# Altium footprint library LimeMicroAltiumLib.PcbLib: 876 footprints (part 29 of 57)
Each footprint in its own frame and in the unit in brackets; x right, y up, seen from the top. Pads: shape width x height; smd on the part's side, far side on the other; paste and mask are expansions set on the pad; w line width, h text height; cw(c..) or ccw(c..) is an arc to the next point about the centre after c.
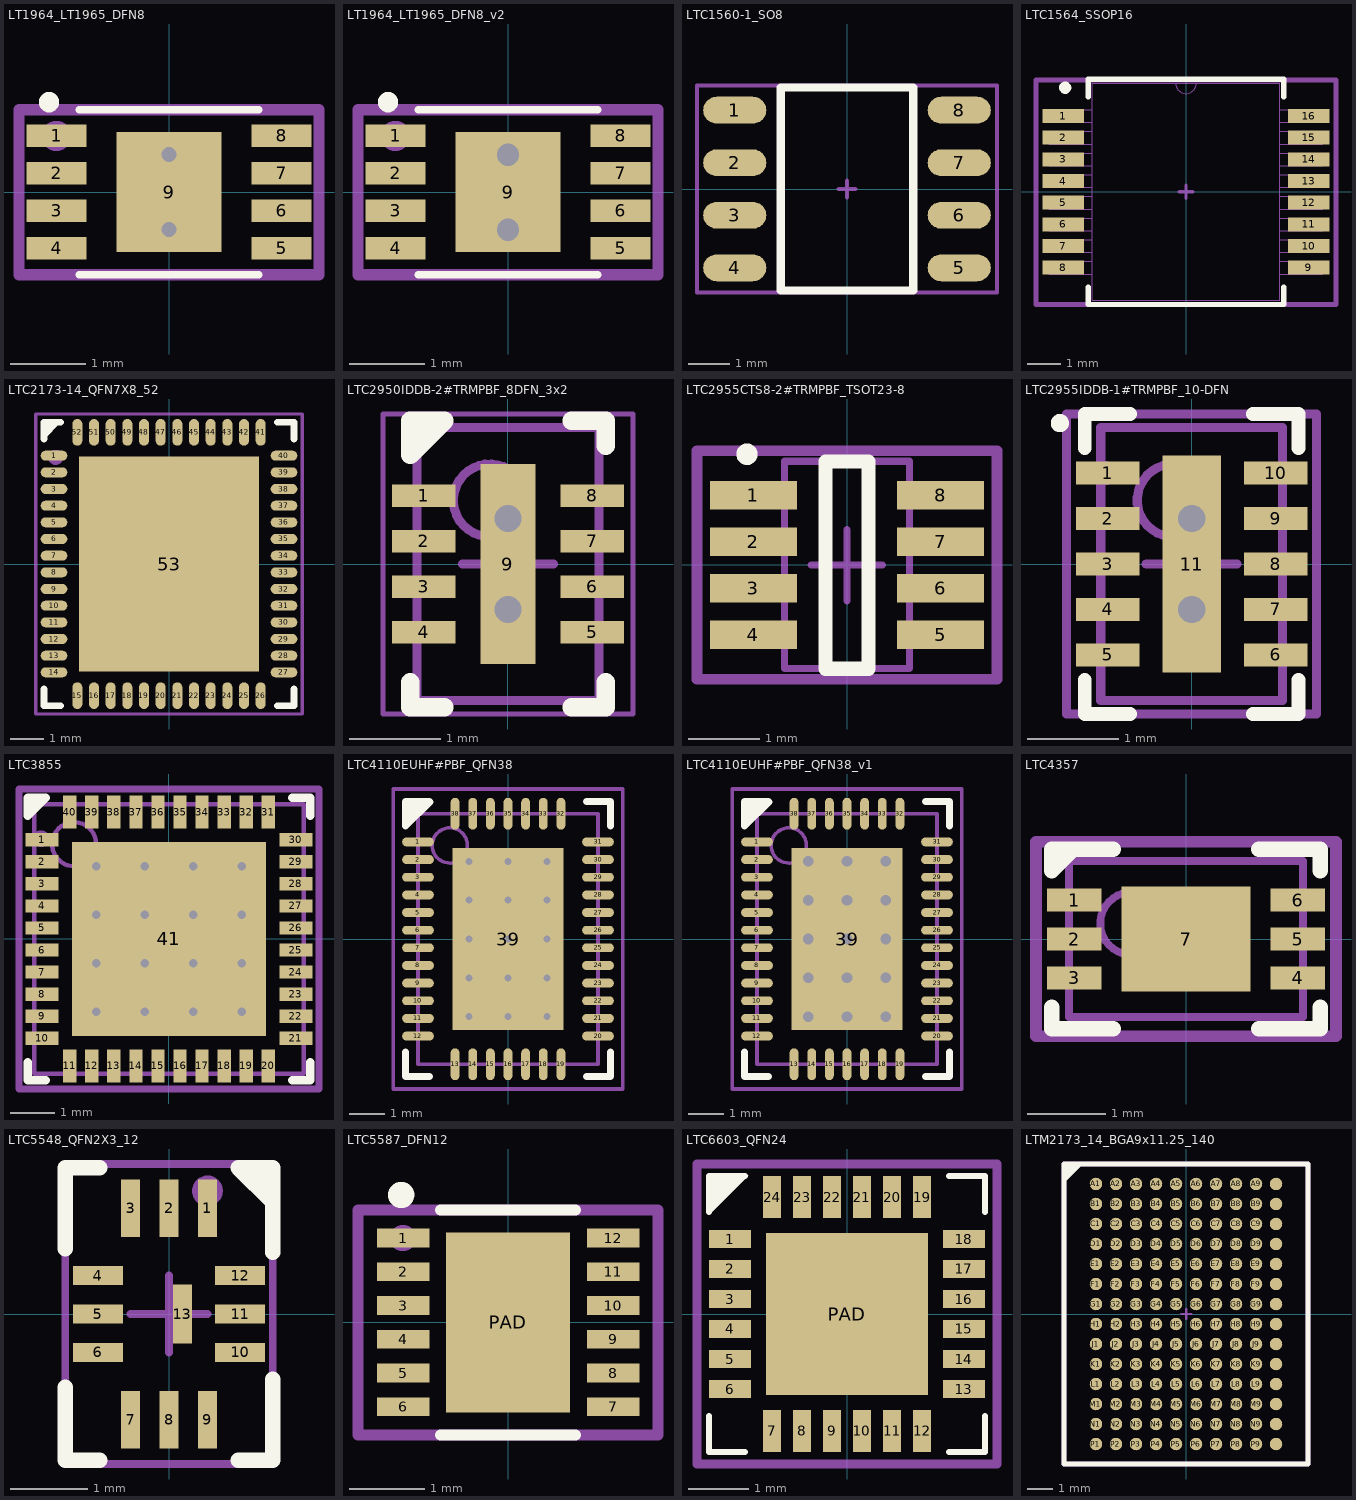
[diagram p28: the footprints below, top view; thin cyan lines are the x and y axes]

## LT1964_LT1965_DFN8 [mm] "LT1964 and LT1965 part DFN8 3x3 footprint"
pads (9):
  rect 0.8x0.3 smd mask+0.05: 1(-1.5,0.75) 2(-1.5,0.25) 3(-1.5,-0.25) 4(-1.5,-0.75) 5(1.5,-0.75) 6(1.5,-0.25) 7(1.5,0.25) 8(1.5,0.75)
  rect 1.4x1.6 smd mask+0.05: 9(0,0)
via 0,0.5 diameter 0.4 hole 0.2
via 0,-0.5 diameter 0.4 hole 0.2
Top Overlay:
  circle w0.2: c-1.6,1.2 r0.035
  lines w0.1: -1.2,-1.1 1.2,-1.1 ; -1.2,1.1 1.2,1.1
Mechanical 15:
  circle w0.3: c-1.5,0.75 r0.05
  lines w0.15: -0.3,0 0.3,0 ; 0,-0.3 0,0.3 ; -2,-1.1 2,-1.1 2,1.1 -2,1.1 -2,-1.1
  text ".Designator" at 0,0 h0.55
3D body "User Library-UDFN-8_2X3_0,5.step": height 0.53, standoff 0, extent -1.5,-1 1.5,1

## LT1964_LT1965_DFN8_v2 [mm] "LT1964 and LT1965 part DFN8 3x3 footprint"
pads (9):
  rect 0.8x0.3 smd mask+0.05: 1(-1.5,0.75) 2(-1.5,0.25) 3(-1.5,-0.25) 4(-1.5,-0.75) 5(1.5,-0.75) 6(1.5,-0.25) 7(1.5,0.25) 8(1.5,0.75)
  rect 1.4x1.6 smd mask+0.05: 9(0,0)
via 0,-0.5 diameter 0.5 hole 0.3
via 0,0.5 diameter 0.5 hole 0.3
Top Overlay:
  circle w0.2: c-1.6,1.2 r0.035
  lines w0.1: -1.2,-1.1 1.2,-1.1 ; -1.2,1.1 1.2,1.1
Mechanical 15:
  circle w0.3: c-1.5,0.75 r0.05
  lines w0.15: -0.3,0 0.3,0 ; 0,-0.3 0,0.3 ; -2,-1.1 -2,1.1 2,1.1 2,-1.1 -2,-1.1
  text ".Designator" at 0,0 h0.55
3D body "User Library-UDFN-8_2X3_0,5.step": height 0.53, standoff 0, extent -1.5,-1 1.5,1

## LTC1560-1_SO8 [mm]
pads (8):
  oval 1.526x0.65 smd mask+0.05: 1(-2.712,1.905) 2(-2.712,0.635) 3(-2.712,-0.635) 4(-2.712,-1.905) 5(2.712,-1.905) 6(2.712,-0.635) 7(2.712,0.635) 8(2.712,1.905)
Top Overlay:
  lines w0.2: -1.6,-2.451 -1.6,2.451 1.6,2.451 1.6,-2.451 -1.6,-2.451
Mechanical 15:
  circle w0.254: c-2.7,1.925 r0.075
  lines w0.1: -0.2,0 0,0 ; 0,-0.2 0,0 ; 0,0.2 0,0 ; 0.2,0 0,0 ; -3.625,-2.5 -3.625,2.5 3.625,2.5 3.625,-2.5 -3.625,-2.5
  text ".Designator" at 0,0 h0.55
3D body "SO-8_S-M.step": height 1.76, standoff 0, extent -3.099,-2.502 3.099,2.502

## LTC1564_SSOP16 [mm]
pads (16):
  rect 1.25x0.42 smd mask+0.05: 1(-3.683,2.276) 2(-3.683,1.626) 3(-3.683,0.975) 4(-3.683,0.325) 5(-3.683,-0.325) 6(-3.683,-0.975) 7(-3.683,-1.626) 8(-3.683,-2.276) 9(3.683,-2.276) 10(3.683,-1.626) 11(3.683,-0.975) 12(3.683,-0.325) 13(3.683,0.325) 14(3.683,0.975) 15(3.683,1.626) 16(3.683,2.276)
Top Overlay:
  circle w0.254: c-3.625,3.125 r0.056
  lines w0.152: -2.934,-2.85 -2.934,-3.378 2.934,-3.378 2.934,-2.85 ; -2.934,2.85 -2.934,3.378 2.934,3.378 2.934,2.85
Mechanical 13:
  lines w0: -0.305,3.251 ccw(c0,3.251) 0.305,3.251
  lines w0.025: -4.102,-2.466 -2.807,-2.466 -2.807,-2.085 -4.102,-2.085 -4.102,-2.466 ; -4.102,-1.816 -2.807,-1.816 -2.807,-1.435 -4.102,-1.435 -4.102,-1.816 ; -4.102,-1.166 -2.807,-1.166 -2.807,-0.785 -4.102,-0.785 -4.102,-1.166 ; -4.102,-0.516 -2.807,-0.516 -2.807,-0.135 -4.102,-0.135 -4.102,-0.516 ; -4.102,0.135 -2.807,0.135 -2.807,0.516 -4.102,0.516 -4.102,0.135 ; -4.102,0.785 -2.807,0.785 -2.807,1.166 -4.102,1.166 -4.102,0.785 ; -4.102,1.435 -2.807,1.435 -2.807,1.816 -4.102,1.816 -4.102,1.435 ; -4.102,2.085 -2.807,2.085 -2.807,2.466 -4.102,2.466 -4.102,2.085 ; -2.807,-3.251 -2.807,3.251 2.807,3.251 2.807,-3.251 -2.807,-3.251 ; 2.807,-2.466 4.102,-2.466 4.102,-2.085 2.807,-2.085 2.807,-2.466 ; 2.807,-1.816 4.102,-1.816 4.102,-1.435 2.807,-1.435 2.807,-1.816 ; 2.807,-1.166 4.102,-1.166 4.102,-0.785 2.807,-0.785 2.807,-1.166 ; 2.807,-0.516 4.102,-0.516 4.102,-0.135 2.807,-0.135 2.807,-0.516 ; 2.807,0.135 4.102,0.135 4.102,0.516 2.807,0.516 2.807,0.135 ; 2.807,0.785 4.102,0.785 4.102,1.166 2.807,1.166 2.807,0.785 ; 2.807,1.435 4.102,1.435 4.102,1.816 2.807,1.816 2.807,1.435 ; 2.807,2.085 4.102,2.085 4.102,2.466 2.807,2.466 2.807,2.085
Mechanical 15:
  circle w0.254: c-3.675,2.275 r0.035
  lines w0.1: -0.2,0 0,0 ; 0,-0.2 0,0.2 0,0 ; 0.2,0 0,0
  lines w0.152: -4.5,-3.384 -4.5,3.35 4.5,3.35 4.5,-3.384 -4.5,-3.384
  text ".Designator" at 0,0 h0.55
3D body "SSOP-16_G-L.step": height 1.7, standoff 0, extent -4.102,-3.251 4.102,3.251

## LTC2173-14_QFN7X8_52 [mm]
pads (53):
  oval 0.8x0.3 smd mask+0.05: 1(-3.45,3.25) 2(-3.45,2.75) 3(-3.45,2.25) 4(-3.45,1.75) 5(-3.45,1.25) 6(-3.45,0.75) 7(-3.45,0.25) 8(-3.45,-0.25) 9(-3.45,-0.75) 10(-3.45,-1.25) 11(-3.45,-1.75) 12(-3.45,-2.25) 13(-3.45,-2.75) 14(-3.45,-3.25) 27(3.45,-3.25) 28(3.45,-2.75) 29(3.45,-2.25) 30(3.45,-1.75) 31(3.45,-1.25) 32(3.45,-0.75) 33(3.45,-0.25) 34(3.45,0.25) 35(3.45,0.75) 36(3.45,1.25) 37(3.45,1.75) 38(3.45,2.25) 39(3.45,2.75) 40(3.45,3.25)
  oval 0.3x0.8 smd mask+0.05: 15(-2.75,-3.95) 16(-2.25,-3.95) 17(-1.75,-3.95) 18(-1.25,-3.95) 19(-0.75,-3.95) 20(-0.25,-3.95) 21(0.25,-3.95) 22(0.75,-3.95) 23(1.25,-3.95) 24(1.75,-3.95) 25(2.25,-3.95) 26(2.75,-3.95) 41(2.75,3.95) 42(2.25,3.95) 43(1.75,3.95) 44(1.25,3.95) 45(0.75,3.95) 46(0.25,3.95) 47(-0.25,3.95) 48(-0.75,3.95) 49(-1.25,3.95) 50(-1.75,3.95) 51(-2.25,3.95) 52(-2.75,3.95)
  rect 5.41x6.45 smd: 53(0,0)
Top Overlay:
  region: -3.25,4.25 -3.75,3.75 -3.75,4.25
  lines w0.2: -3.75,-3.75 -3.75,-4.25 -3.25,-4.25 ; -3.75,3.75 -3.75,4.25 -3.25,4.25 ; 3.25,-4.25 3.75,-4.25 3.75,-3.75 ; 3.25,4.25 3.75,4.25 3.75,3.75
Mechanical 15:
  circle w0.254: c-3.4,3.2 r0.1
  lines w0.1: -0.2,0 0,0 ; 0,-0.2 0,0 ; 0,0.2 0,0 ; 0.2,0 0,0 ; -4,-4.5 4,-4.5 4,4.5 -4,4.5 -4,-4.5
  text ".Designator" at 0,0 h0.55
3D body "QFN-52_UKG-M.step": height 0.81, standoff 0, extent -3.556,-4.051 3.556,4.051

## LTC2950IDDB-2#TRMPBF_8DFN_3x2 [mm] "SON, 8-Leads, Body 3x2mm, Pitch 0.5mm, Thermal Pad 2.2x0.61mm"
height 0.8
pads (9):
  rect 0.7x0.25 smd mask+0.05: 1(-0.925,0.75) 2(-0.925,0.25) 3(-0.925,-0.25) 4(-0.925,-0.75) 5(0.925,-0.75) 6(0.925,-0.25) 7(0.925,0.25) 8(0.925,0.75)
  rect 0.61x2.2 smd mask+0.05: 9(0,0)
via 0,0.5 diameter 0.6 hole 0.3
via 0,-0.5 diameter 0.6 hole 0.3
Top Overlay:
  region: -1.075,1.2 -0.7,1.575 -1.075,1.575
  lines w0.2: -1.075,-1.3 -1.075,-1.575 -0.7,-1.575 ; 0.7,-1.575 1.075,-1.575 1.075,-1.3 ; 0.7,1.575 1.075,1.575 1.075,1.3 ; -1.075,1.2 -0.7,1.575 -1.075,1.575 -1.075,1.2
Mechanical 13:
  circle w0.1: c-0.2,0.7 r0.4
  lines w0.1: -1,-1.5 -1,1.5 1,1.5 1,-1.5 -1,-1.5
Mechanical 15:
  circle w0.15: c-1,0.75 r0.056
  lines w0.05: -1.375,-1.65 -1.375,1.65 1.375,1.65 1.375,-1.65 -1.375,-1.65
  lines w0.1: -0.5,0 0.5,0 ; 0,-0.5 0,0.5
  text ".Designator" at 0,0 h0.55
3D body: height 0.81, standoff 0, extent -0.874,0.95 -0.476,1.35
3D body: height 0.8, standoff 0, extent -1,-1.5 1,1.5

## LTC2955CTS8-2#TRMPBF_TSOT23-8 [mm] "SOT23, 8-Leads, Body 2.9x1.75mm, Pitch 0.65mm"
height 1
pads (8):
  rect 1.22x0.4 smd mask+0.05: 1(-1.31,0.975) 2(-1.31,0.325) 3(-1.31,-0.325) 4(-1.31,-0.975) 5(1.31,-0.975) 6(1.31,-0.325) 7(1.31,0.325) 8(1.31,0.975)
Top Overlay:
  circle w0.15: c-1.4,1.55 r0.075
  lines w0.2: -0.3,-1.454 0.3,-1.454 0.3,1.446 -0.3,1.446 -0.3,-1.454
Mechanical 13:
  lines w0.1: -0.875,-1.45 -0.875,1.45 0.875,1.45 0.875,-1.45 -0.875,-1.45
Mechanical 15:
  circle w0.15: c-1.5,1 r0.075
  lines w0.1: -0.501,-0.004 0.499,-0.004 ; -0.001,-0.504 -0.001,0.496
  lines w0.15: -2.1,-1.6 2.1,-1.6 2.1,1.6 -2.1,1.6 -2.1,-1.6
  text ".Designator" at -0.001,-0.004 h0.55
3D body "User Library-TSOT-23-8-1.STEP": height 1, standoff 0, extent -1.4,-1.45 1.4,1.45

## LTC2955IDDB-1#TRMPBF_10-DFN [mm] "SON, 10-Leads, Body 3x2mm, Pitch 0.5mm, Thermal Pad 2.39x0.64mm"
height 0.8
pads (11):
  rect 0.7x0.25 smd mask+0.05: 1(-0.925,1) 2(-0.925,0.5) 3(-0.925,0) 4(-0.925,-0.5) 5(-0.925,-1) 6(0.925,-1) 7(0.925,-0.5) 8(0.925,0) 9(0.925,0.5) 10(0.925,1)
  rect 0.64x2.39 smd mask+0.05: 11(0,0)
via 0,-0.5 diameter 0.6 hole 0.3
via 0,0.5 diameter 0.6 hole 0.3
Top Overlay:
  circle w0.1: c-1.45,1.55 r0.05
  lines w0.15: -1.175,-1.275 -1.175,-1.65 -0.675,-1.65 ; -1.175,1.275 -1.175,1.65 -0.675,1.65 ; 0.675,-1.65 1.175,-1.65 1.175,-1.275 ; 0.675,1.65 1.175,1.65 1.175,1.275
Mechanical 13:
  circle w0.1: c-0.2,0.7 r0.4
  lines w0.1: -1,-1.5 1,-1.5 1,1.5 -1,1.5 -1,-1.5
Mechanical 15:
  circle w0.15: c-0.95,1 r0.056
  lines w0.1: -0.5,0 0.5,0 ; 0,-0.5 0,0.5 ; -1.375,-1.65 1.375,-1.65 1.375,1.65 -1.375,1.65 -1.375,-1.65
  text ".Designator" at 0,0 h0.55
3D body "User Library-My-DFN-10-3x2-0_5.STEP": height 0.8, standoff 0, extent -1.06,-1.55 1.06,1.55

## LTC3855 [mm] "QFN, 40-Leads, Body 6,00x6,00mm, Pitch 0,50mm, Thermal Pad 4,40x4,40mm, IPC Medium Density"
height 0.8
pads (41):
  rect 0.75x0.3 smd mask+0.05: 1(-2.875,2.25) 2(-2.875,1.75) 3(-2.875,1.25) 4(-2.875,0.75) 5(-2.875,0.25) 6(-2.875,-0.25) 7(-2.875,-0.75) 8(-2.875,-1.25) 9(-2.875,-1.75) 10(-2.875,-2.25) 21(2.875,-2.25) 22(2.875,-1.75) 23(2.875,-1.25) 24(2.875,-0.75) 25(2.875,-0.25) 26(2.875,0.25) 27(2.875,0.75) 28(2.875,1.25) 29(2.875,1.75) 30(2.875,2.25)
  rect 0.3x0.75 smd mask+0.05: 11(-2.25,-2.875) 12(-1.75,-2.875) 13(-1.25,-2.875) 14(-0.75,-2.875) 15(-0.25,-2.875) 16(0.25,-2.875) 17(0.75,-2.875) 18(1.25,-2.875) 19(1.75,-2.875) 20(2.25,-2.875) 31(2.25,2.875) 32(1.75,2.875) 33(1.25,2.875) 34(0.75,2.875) 35(0.25,2.875) 36(-0.25,2.875) 37(-0.75,2.875) 38(-1.25,2.875) 39(-1.75,2.875) 40(-2.25,2.875)
  rect 4.4x4.4 smd mask+0.05: 41(0,0)
via -1.65,1.65 diameter 0.4 hole 0.2
via -0.55,1.65 diameter 0.4 hole 0.2
via 0.55,1.65 diameter 0.4 hole 0.2
via 1.65,1.65 diameter 0.4 hole 0.2
via -1.65,0.55 diameter 0.4 hole 0.2
via -0.55,0.55 diameter 0.4 hole 0.2
via 0.55,0.55 diameter 0.4 hole 0.2
via 1.65,0.55 diameter 0.4 hole 0.2
via -1.65,-0.55 diameter 0.4 hole 0.2
via -0.55,-0.55 diameter 0.4 hole 0.2
via 0.55,-0.55 diameter 0.4 hole 0.2
via 1.65,-0.55 diameter 0.4 hole 0.2
via -1.65,-1.65 diameter 0.4 hole 0.2
via -0.55,-1.65 diameter 0.4 hole 0.2
via 0.55,-1.65 diameter 0.4 hole 0.2
via 1.65,-1.65 diameter 0.4 hole 0.2
Top Overlay:
  region: -3.2,2.8 -3.2,3.2 -2.8,3.2
  lines w0.2: -3.2,-2.8 -3.2,-3.2 -2.8,-3.2 ; 2.8,-3.2 3.2,-3.2 3.2,-2.8 ; 2.8,3.2 3.2,3.2 3.2,2.8 ; -3.2,2.8 -2.8,3.2 -3.2,3.2 -3.2,2.8
Mechanical 13:
  circle w0.1: c-2.15,2.15 r0.5
  lines w0.1: -3.05,-3.05 -3.05,3.05 3.05,3.05 3.05,-3.05 -3.05,-3.05
Mechanical 15:
  circle w0.3: c-2.9,2.275 r0.035
  lines w0.15: -0.5,0 0.5,0 ; 0,-0.5 0,0.5 ; -3.4,-3.4 -3.4,3.4 3.4,3.4 3.4,-3.4 -3.4,-3.4
  text ".Designator" at 0,0 h0.55
3D body "User Library-QFN40.step": height 0.8, standoff 0, extent -3,-3 3,3

## LTC4110EUHF#PBF_QFN38 [mm] "QFN, 38-Leads, Body 7.1x5.1mm, Pitch 0.5mm, Thermal Pad 3.15x5.15mm, IPC Low Density"
height 0.8
pads (39):
  oval 0.9x0.25 smd mask+0.05: 1(-2.55,2.75) 2(-2.55,2.25) 3(-2.55,1.75) 4(-2.55,1.25) 5(-2.55,0.75) 6(-2.55,0.25) 7(-2.55,-0.25) 8(-2.55,-0.75) 9(-2.55,-1.25) 10(-2.55,-1.75) 11(-2.55,-2.25) 12(-2.55,-2.75) 20(2.55,-2.75) 21(2.55,-2.25) 22(2.55,-1.75) 23(2.55,-1.25) 24(2.55,-0.75) 25(2.55,-0.25) 26(2.55,0.25) 27(2.55,0.75) 28(2.55,1.25) 29(2.55,1.75) 30(2.55,2.25) 31(2.55,2.75)
  oval 0.25x0.9 smd mask+0.05: 13(-1.5,-3.55) 14(-1,-3.55) 15(-0.5,-3.55) 16(0,-3.55) 17(0.5,-3.55) 18(1,-3.55) 19(1.5,-3.55) 32(1.5,3.55) 33(1,3.55) 34(0.5,3.55) 35(0,3.55) 36(-0.5,3.55) 37(-1,3.55) 38(-1.5,3.55)
  rect 3.15x5.15 smd mask+0.05: 39(0,0)
via -1.1,2.2 diameter 0.5 hole 0.2
via 0,2.2 diameter 0.5 hole 0.2
via 1.1,2.2 diameter 0.5 hole 0.2
via -1.1,1.1 diameter 0.5 hole 0.2
via 0,1.1 diameter 0.5 hole 0.2
via 1.1,1.1 diameter 0.5 hole 0.2
via -1.1,0 diameter 0.5 hole 0.2
via 0,0 diameter 0.5 hole 0.2
via 1.1,0 diameter 0.5 hole 0.2
via -1.1,-1.1 diameter 0.5 hole 0.2
via 0,-1.1 diameter 0.5 hole 0.2
via 1.1,-1.1 diameter 0.5 hole 0.2
via -1.1,-2.2 diameter 0.5 hole 0.2
via 0,-2.2 diameter 0.5 hole 0.2
via 1.1,-2.2 diameter 0.5 hole 0.2
Top Overlay:
  region: -2.9,3.2 -2.213,3.888 -2.225,3.9 -2.9,3.9
  lines w0.2: -2.9,-3.2 -2.9,-3.9 -2.225,-3.9 ; -2.225,3.9 -2.9,3.9 -2.9,3.2 -2.213,3.888 ; 2.225,-3.9 2.9,-3.9 2.9,-3.2 ; 2.225,3.9 2.9,3.9 2.9,3.2
Mechanical 13:
  circle w0.1: c-1.65,2.65 r0.5
  lines w0.1: -2.55,-3.55 -2.55,3.55 2.55,3.55 2.55,-3.55 -2.55,-3.55
Mechanical 15:
  lines w0.1: -0.5,0 0.5,0 ; 0,-0.5 0,0.5 ; -3.25,-4.25 -3.25,4.25 3.25,4.25 3.25,-4.25 -3.25,-4.25
  text ".Designator" at 0,0 h0.55
3D body "User Library-QFN-38.STEP": height 1.04, standoff -0.09, extent -2.5,-3.51 2.52,3.51

## LTC4110EUHF#PBF_QFN38_v1 [mm] "QFN, 38-Leads, Body 7.1x5.1mm, Pitch 0.5mm, Thermal Pad 3.15x5.15mm, IPC Low Density"
height 0.8
pads (39):
  oval 0.9x0.25 smd mask+0.05: 1(-2.55,2.75) 2(-2.55,2.25) 3(-2.55,1.75) 4(-2.55,1.25) 5(-2.55,0.75) 6(-2.55,0.25) 7(-2.55,-0.25) 8(-2.55,-0.75) 9(-2.55,-1.25) 10(-2.55,-1.75) 11(-2.55,-2.25) 12(-2.55,-2.75) 20(2.55,-2.75) 21(2.55,-2.25) 22(2.55,-1.75) 23(2.55,-1.25) 24(2.55,-0.75) 25(2.55,-0.25) 26(2.55,0.25) 27(2.55,0.75) 28(2.55,1.25) 29(2.55,1.75) 30(2.55,2.25) 31(2.55,2.75)
  oval 0.25x0.9 smd mask+0.05: 13(-1.5,-3.55) 14(-1,-3.55) 15(-0.5,-3.55) 16(0,-3.55) 17(0.5,-3.55) 18(1,-3.55) 19(1.5,-3.55) 32(1.5,3.55) 33(1,3.55) 34(0.5,3.55) 35(0,3.55) 36(-0.5,3.55) 37(-1,3.55) 38(-1.5,3.55)
  rect 3.15x5.15 smd mask+0.05: 39(0,0)
via 1.1,-2.2 diameter 0.6 hole 0.3
via 0,-2.2 diameter 0.6 hole 0.3
via -1.1,-2.2 diameter 0.6 hole 0.3
via 1.1,-1.1 diameter 0.6 hole 0.3
via 0,-1.1 diameter 0.6 hole 0.3
via -1.1,-1.1 diameter 0.6 hole 0.3
via 1.1,0 diameter 0.6 hole 0.3
via 0,0 diameter 0.6 hole 0.3
via -1.1,0 diameter 0.6 hole 0.3
via 1.1,1.1 diameter 0.6 hole 0.3
via 0,1.1 diameter 0.6 hole 0.3
via -1.1,1.1 diameter 0.6 hole 0.3
via 1.1,2.2 diameter 0.6 hole 0.3
via 0,2.2 diameter 0.6 hole 0.3
via -1.1,2.2 diameter 0.6 hole 0.3
Top Overlay:
  region: -2.9,3.2 -2.213,3.888 -2.225,3.9 -2.9,3.9
  lines w0.2: -2.9,-3.2 -2.9,-3.9 -2.225,-3.9 ; -2.225,3.9 -2.9,3.9 -2.9,3.2 -2.213,3.888 ; 2.225,-3.9 2.9,-3.9 2.9,-3.2 ; 2.225,3.9 2.9,3.9 2.9,3.2
Mechanical 13:
  circle w0.1: c-1.65,2.65 r0.5
  lines w0.1: -2.55,-3.55 2.55,-3.55 2.55,3.55 -2.55,3.55 -2.55,-3.55
Mechanical 15:
  lines w0.1: -0.5,0 0.5,0 ; 0,-0.5 0,0.5 ; -3.25,-4.25 3.25,-4.25 3.25,4.25 -3.25,4.25 -3.25,-4.25
  text ".Designator" at 0,0 h0.55
3D body "User Library-QFN-38.STEP": height 1.04, standoff -0.09, extent -2.5,-3.51 2.52,3.51

## LTC4357 [mm] "SON, 6-Leads, Body 2,00x3,00mm, Pitch 0,50mm, Thermal Pad 1,35x1,12mm, IPC Medium Density"
height 0.8
pads (7):
  rect 0.7x0.3 smd mask+0.05: 1(-1.435,0.5) 2(-1.435,0) 3(-1.435,-0.5) 4(1.435,-0.5) 5(1.435,0) 6(1.435,0.5)
  rect 1.65x1.35 smd mask+0.05: 7(0,0)
Top Overlay:
  lines w0.2: -1.725,-0.875 -1.725,-1.15 -0.935,-1.15 ; -1.463,1.138 -1.725,0.875 -1.725,1.15 -0.935,1.15 ; 0.935,-1.15 1.725,-1.15 1.725,-0.875 ; 0.935,1.15 1.725,1.15 1.725,0.875
Mechanical 13:
  circle w0.1: c-0.7,0.2 r0.4
  lines w0.1: -1.5,-1 1.5,-1 1.5,1 -1.5,1 -1.5,-1
Mechanical 15:
  circle w0.15: c-1.475,0.5 r0.056
  lines w0.15: -0.5,0 0.5,0 ; 0,-0.5 0,0.5 ; -1.925,-1.25 1.925,-1.25 1.925,1.25 -1.925,1.25 -1.925,-1.25
  text ".Designator" at 0,-0.1 h0.55
3D body: height 0.8, standoff 0.2, extent -1.5,-1 1.5,1

## LTC5548_QFN2X3_12 [mm] "QFN, 12-Leads, Body 2,00x3,00mm, Pitch 0,50mm, IPC High Density"
height 0.8
pads (13):
  rect 0.25x0.75 smd mask+0.05: 1(0.5,1.375) 2(0,1.375) 3(-0.5,1.375) 7(-0.5,-1.375) 8(0,-1.375) 9(0.5,-1.375)
  rect 0.65x0.25 smd mask+0.05: 4(-0.925,0.5) 5(-0.925,0) 6(-0.925,-0.5) 10(0.925,-0.5) 11(0.925,0) 12(0.925,0.5)
  rect 0.25x0.77 smd mask+0.05: 13(0.175,0)
Top Overlay:
  region: 0.9,1.9 1.35,1.45 1.35,1.9
  lines w0.2: -1.35,-0.95 -1.35,-1.9 -0.9,-1.9 ; -1.35,0.85 -1.35,1.9 -0.9,1.9 ; 0.9,-1.9 1.35,-1.9 1.35,-1.05 1.35,-0.85 ; 1.35,0.8 1.35,1.9 0.9,1.9 1.35,1.45
Mechanical 15:
  circle w0.2: c0.5,1.6 r0.1
  lines w0.1: -0.5,0 0.5,0 ; 0,-0.5 0,0.5 ; -1.35,-1.95 1.35,-1.95 1.35,1.95 -1.35,1.95 -1.35,-1.95
  text ".Designator" at 0,-0.008 h0.55
3D body: height 0.8, standoff 0.05, extent -1,-1.524 1,1.5

## LTC5587_DFN12 [mm]
pads (13):
  rect 0.7x0.25 smd mask+0.05: 1(-1.4,1.125) 2(-1.4,0.675) 3(-1.4,0.225) 4(-1.4,-0.225) 5(-1.4,-0.675) 6(-1.4,-1.125) 7(1.4,-1.125) 8(1.4,-0.675) 9(1.4,-0.225) 10(1.4,0.225) 11(1.4,0.675) 12(1.4,1.125)
  rect 1.65x2.4 smd mask+0.05: PAD(0,0)
Top Overlay:
  circle w0.3: c-1.425,1.7 r0.025
  lines w0.15: -0.9,-1.5 0.9,-1.5 ; -0.9,1.5 0.9,1.5
Mechanical 15:
  circle w0.3: c-1.4,1.125 r0.025
  lines w0.15: -0.5,0 0.5,0 ; 0,-0.5 0,0.5 ; -2,-1.5 -2,1.5 2,1.5 2,-1.5 -2,-1.5
  text ".Designator" at 0,0 h0.55
3D body "User Library-DFN12(3x3).step": height 0.76, standoff 0, extent -1.501,-1.5 1.501,1.5

## LTC6603_QFN24 [mm]
pads (25):
  rect 0.7x0.3 smd mask+0.05: 1(-1.95,1.25) 2(-1.95,0.75) 3(-1.95,0.25) 4(-1.95,-0.25) 5(-1.95,-0.75) 6(-1.95,-1.25) 13(1.95,-1.25) 14(1.95,-0.75) 15(1.95,-0.25) 16(1.95,0.25) 17(1.95,0.75) 18(1.95,1.25)
  rect 0.3x0.7 smd mask+0.05: 7(-1.25,-1.95) 8(-0.75,-1.95) 9(-0.25,-1.95) 10(0.25,-1.95) 11(0.75,-1.95) 12(1.25,-1.95) 19(1.25,1.95) 20(0.75,1.95) 21(0.25,1.95) 22(-0.25,1.95) 23(-0.75,1.95) 24(-1.25,1.95)
  rect 2.7x2.7 smd mask+0.05: PAD(0,0)
Top Overlay:
  region: -2.3,2.3 -1.65,2.3 -2.3,1.65
  lines w0.1: -2.3,-1.7 -2.3,-2.3 -1.7,-2.3 ; -2.3,1.7 -2.3,2.3 -1.7,2.3 ; 1.7,-2.3 2.3,-2.3 2.3,-1.7 ; 1.7,2.3 2.3,2.3 2.3,1.7
Mechanical 15:
  circle w0.1: c-1.975,1.25 r0.05
  lines w0.15: -0.2,0 0.2,0 ; 0,-0.2 0,0.2 ; -2.5,-2.5 -2.5,2.5 2.5,2.5 2.5,-2.5 -2.5,-2.5
  text ".Designator" at 0,0 h0.55
3D body "User Library-QFN 24 4x4.step": height 0.9, standoff 0, extent -2.002,-2.002 2.002,2.002

## LTM2173_14_BGA9x11.25_140 [mm]
pads (140):
  round 0.5 smd: A1(-3.6,5.2) A2(-2.8,5.2) A3(-2,5.2) A4(-1.2,5.2) A5(-0.4,5.2) A6(0.4,5.2) A7(1.2,5.2) A8(2,5.2) A9(2.8,5.2) A10(3.6,5.2) B1(-3.6,4.4) B2(-2.8,4.4) B3(-2,4.4) B4(-1.2,4.4) B5(-0.4,4.4) B6(0.4,4.4) B7(1.2,4.4) B8(2,4.4) B9(2.8,4.4) B10(3.6,4.4) C1(-3.6,3.6) C2(-2.8,3.6) C3(-2,3.6) C4(-1.2,3.6) C5(-0.4,3.6) C6(0.4,3.6) C7(1.2,3.6) C8(2,3.6) C9(2.8,3.6) C10(3.6,3.6) D1(-3.6,2.8) D2(-2.8,2.8) D3(-2,2.8) D4(-1.2,2.8) D5(-0.4,2.8) D6(0.4,2.8) D7(1.2,2.8) D8(2,2.8) D9(2.8,2.8) D10(3.6,2.8) E1(-3.6,2) E2(-2.8,2) E3(-2,2) E4(-1.2,2) E5(-0.4,2) E6(0.4,2) E7(1.2,2) E8(2,2) E9(2.8,2) E10(3.6,2) F1(-3.6,1.2) F2(-2.8,1.2) F3(-2,1.2) F4(-1.2,1.2) F5(-0.4,1.2) F6(0.4,1.2) F7(1.2,1.2) F8(2,1.2) F9(2.8,1.2) F10(3.6,1.2) G1(-3.6,0.4) G2(-2.8,0.4) G3(-2,0.4) G4(-1.2,0.4) G5(-0.4,0.4) G6(0.4,0.4) G7(1.2,0.4) G8(2,0.4) G9(2.8,0.4) G10(3.6,0.4) H1(-3.6,-0.4) H2(-2.8,-0.4) H3(-2,-0.4) H4(-1.2,-0.4) H5(-0.4,-0.4) H6(0.4,-0.4) H7(1.2,-0.4) H8(2,-0.4) H9(2.8,-0.4) H10(3.6,-0.4) J1(-3.6,-1.2) J2(-2.8,-1.2) J3(-2,-1.2) J4(-1.2,-1.2) J5(-0.4,-1.2) J6(0.4,-1.2) J7(1.2,-1.2) J8(2,-1.2) J9(2.8,-1.2) J10(3.6,-1.2) K1(-3.6,-2) K2(-2.8,-2) K3(-2,-2) K4(-1.2,-2) K5(-0.4,-2) K6(0.4,-2) K7(1.2,-2) K8(2,-2) K9(2.8,-2) K10(3.6,-2) L1(-3.6,-2.8) L2(-2.8,-2.8) L3(-2,-2.8) L4(-1.2,-2.8) L5(-0.4,-2.8) L6(0.4,-2.8) L7(1.2,-2.8) L8(2,-2.8) L9(2.8,-2.8) L10(3.6,-2.8) M1(-3.6,-3.6) M2(-2.8,-3.6) M3(-2,-3.6) M4(-1.2,-3.6) M5(-0.4,-3.6) M6(0.4,-3.6) M7(1.2,-3.6) M8(2,-3.6) M9(2.8,-3.6) M10(3.6,-3.6) N1(-3.6,-4.4) N2(-2.8,-4.4) N3(-2,-4.4) N4(-1.2,-4.4) N5(-0.4,-4.4) N6(0.4,-4.4) N7(1.2,-4.4) N8(2,-4.4) N9(2.8,-4.4) N10(3.6,-4.4) P1(-3.6,-5.2) P2(-2.8,-5.2) P3(-2,-5.2) P4(-1.2,-5.2) P5(-0.4,-5.2) P6(0.4,-5.2) P7(1.2,-5.2) P8(2,-5.2) P9(2.8,-5.2) P10(3.6,-5.2)
Top Overlay:
  region: -4.15,5.975 -4.875,5.25 -4.875,5.975
  lines w0.2: -4.875,-6 -4.875,6 4.875,6 4.875,-6 -4.875,-6
Mechanical 15:
  circle w0.254: c-3.6,5.2 r0.1
  lines w0.1: -0.2,0 0,0 ; 0,-0.2 0,0.2 0,0 ; 0.2,0 0,0
  lines w0.2: -4.875,-6 -4.875,6 4.875,6 4.875,-6 -4.875,-6
  text ".Designator" at 0,0 h0.55
3D body: height 2.73, standoff 0, extent -3.948,4.8 -3.55,5.2
3D body: height 2.72, standoff 0, extent -4.5,-5.625 4.5,5.625